# Altium footprint library PCB1.PcbLib: 34 footprints (part 3 of 3)
Each footprint in its own frame and in the unit in brackets; x right, y up, seen from the top. Pads: shape width x height; smd on the part's side, far side on the other; paste and mask are expansions set on the pad; w line width, h text height; cw(c..) or ccw(c..) is an arc to the next point about the centre after c.
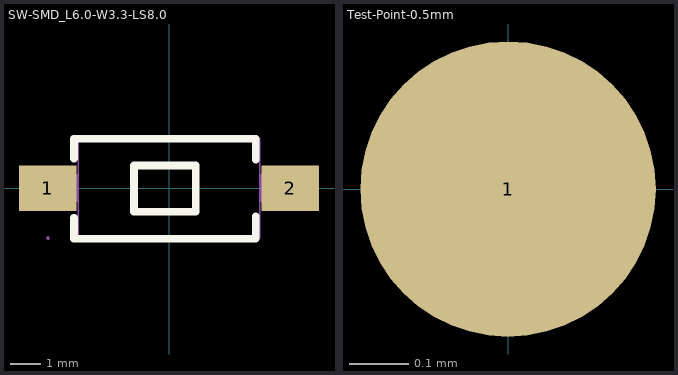
[diagram p2: the footprints below, top view; thin cyan lines are the x and y axes]

## SW-SMD_L6.0-W3.3-LS8.0 [mil]
pads (2):
  rect 74.8x59.1 smd: 1(-157.5,0) 2(157.5,0)
Top Overlay:
  lines w10: -123.5,-38.6 -123.5,-65.7 112.7,-65.7 112.7,-36.8 ; -123.5,38.6 -123.5,64.3 112.7,64.3 112.7,36.8 ; -45.4,-30.7 -45.4,29.3 34.6,29.3 34.6,-30.7 -45.4,-30.7
Mechanical 7:
  lines w2: -118.1,-65 118.1,-65 118.1,65 -118.1,65 -118.1,-65
Mechanical 8:
  region: -155.1,-65 -155.5,-66.2 -156.5,-67.1 -157.8,-67.3 -159,-66.7 -159.7,-65.6 -159.7,-64.3 -159,-63.2 -157.8,-62.6 -156.5,-62.8 -155.5,-63.7
Mechanical 9:
  region: 129.9,-17.7 129.9,17.7 157.5,17.7 157.5,-17.7
  region: -157.5,-17.7 -157.5,17.7 -129.9,17.7 -129.9,-17.7
Mechanical 10:
  region: -142.5,-17.7 -142.5,17.7 -117.7,17.7 -117.7,-17.7
  region: 142.5,17.7 142.5,-17.7 117.7,-17.7 117.7,17.7

## Test-Point-0.5mm [mil]
pads (1):
  round 19.7 smd: 1(0,0)